# Altium footprint library Capacitor.PcbLib: 73 footprints (part 4 of 5)
Each footprint in its own frame and in the unit in brackets; x right, y up, seen from the top. Pads: shape width x height; smd on the part's side, far side on the other; paste and mask are expansions set on the pad; w line width, h text height; cw(c..) or ccw(c..) is an arc to the next point about the centre after c.
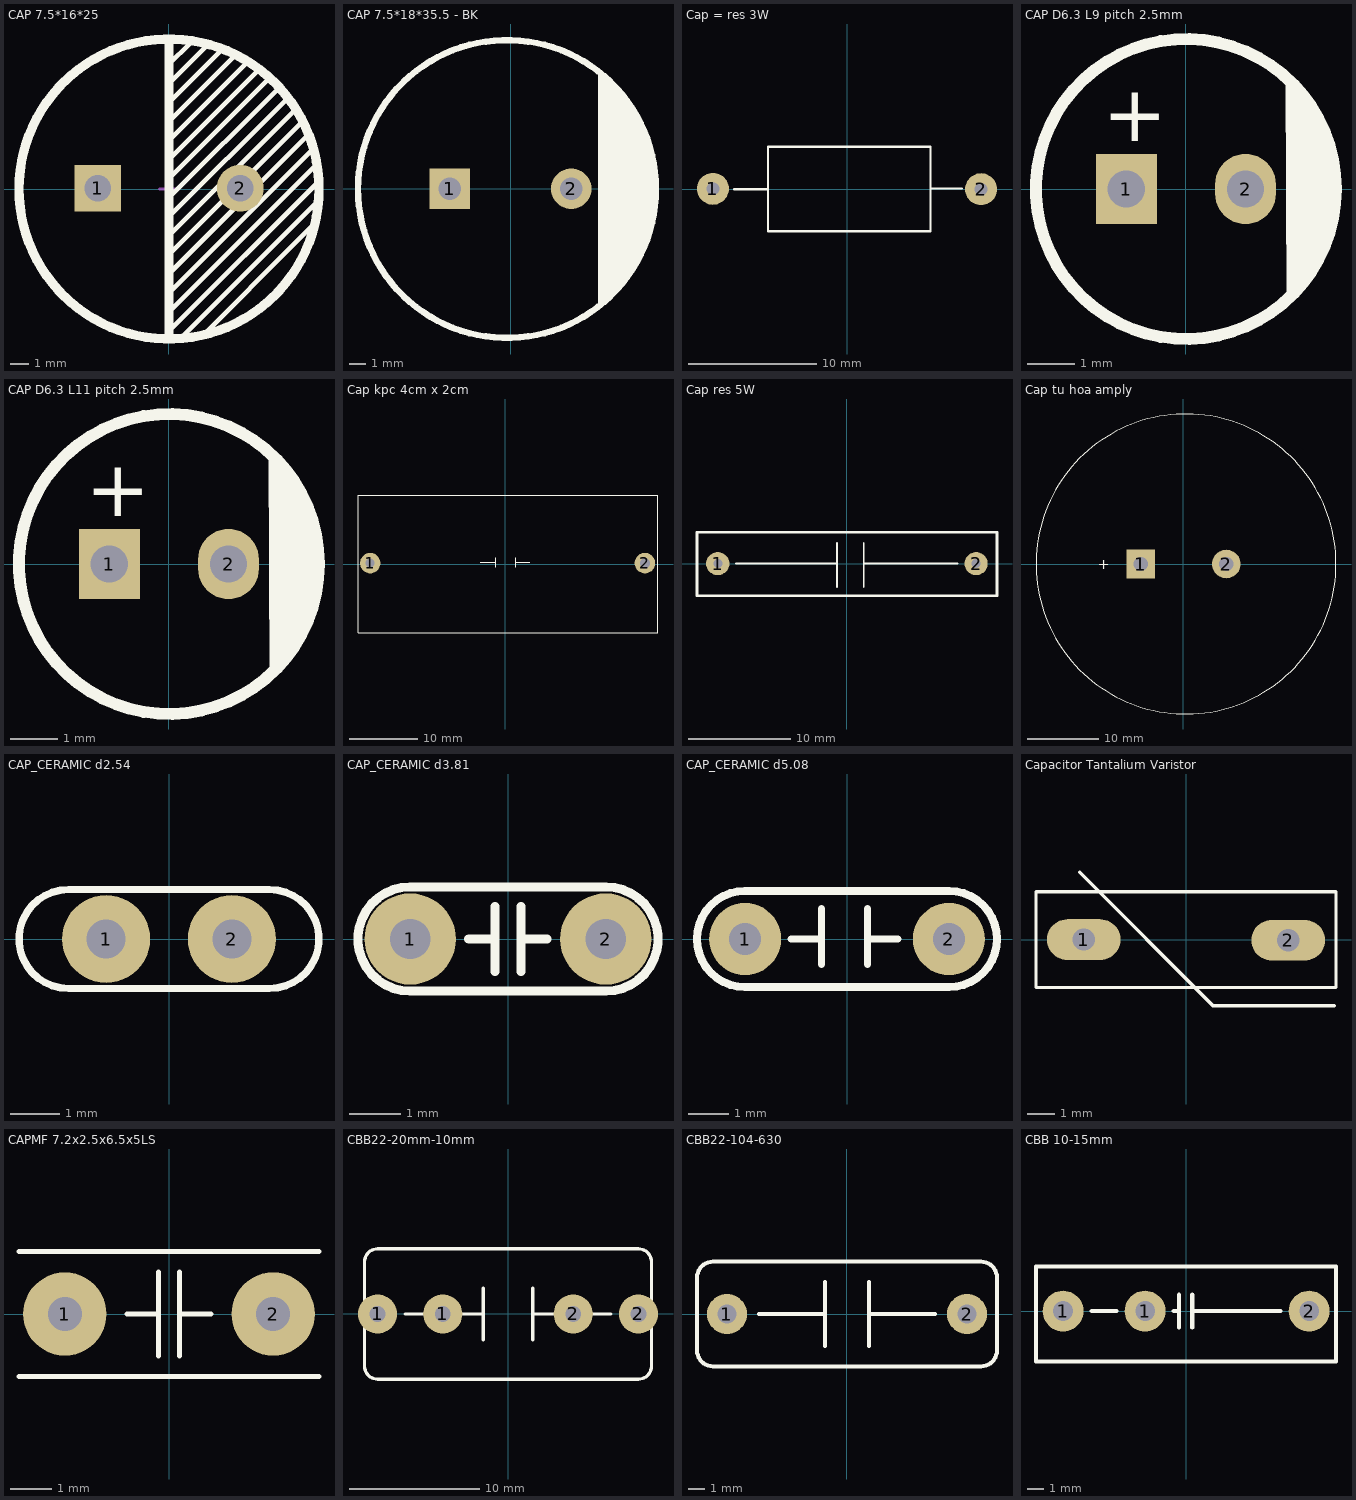
[diagram p3: the footprints below, top view; thin cyan lines are the x and y axes]

## CAP 7.5*16*25 [mm]
pads (2):
  rect 2.5x2.5 hole 1.4: 1(-3.8,0.038)
  round 2.5 hole 1.4: 2(3.8,0.038)
Top Overlay:
  circle w0.5: c0,0 r8
  lines w0.254: 0,-7.582 8.001,0.419 ; 0,-6.566 7.874,1.308 ; 0,-5.55 7.62,2.07 ; 0,-4.534 7.366,2.832 ; 0,-3.518 6.972,3.454 ; 0,-2.502 6.604,4.102 ; 0,-1.486 6.223,4.737 ; 0,-0.47 5.905,5.436 ; 0,0.546 5.296,5.842 ; 0,1.562 4.826,6.388 ; 0,2.578 4.064,6.642 ; 0,3.594 3.556,7.15 ; 0,4.61 2.54,7.15 2.769,7.379 ; 0,5.626 2.032,7.658 ; 0,6.642 1.143,7.785 ; 0.66,-7.938 7.938,-0.66 ; 2.032,-7.582 6.604,-3.01 7.81,-1.803
  lines w0.5: 0,-7.963 0,7.963
Top Designator:
  text ".Designator" at -3.71,-0.344 h1.52
Mechanical 12:
  lines w0.15: -0.5,0 0.5,0 ; 0,-0.5 0,0.5
3D body "CAP 7.5X16X25.STEP": height 25.03, standoff -3.38, extent -7.987,-7.999 8.01,7.999

## CAP 7.5*18*35.5 - BK [mm] "Pin to Pin 7.5mm. DxL 18x35.5mm"
pads (2):
  rect 2.5x2.5 hole 1.4: 1(-3.78,0)
  round 2.5 hole 1.4: 2(3.72,0)
Top Overlay:
  circle w0.4: c-0.248,-0.013 r9.2
  region: 5.375,-7.061 5.375,-7.098 5.413,-7.16 5.479,-7.192 5.552,-7.184 5.58,-7.162 5.852,-6.95 6.361,-6.487 6.833,-5.988 7.267,-5.453 7.659,-4.888 8.007,-4.294 8.309,-3.676 8.563,-3.037 8.768,-2.38 8.923,-1.71 9.027,-1.03 9.079,-0.344 9.079,0 9.079,0.344 9.027,1.03 8.923,1.71 8.768,2.38 8.563,3.037 8.309,3.676 8.007,4.294 7.659,4.888 7.267,5.453 6.833,5.988 6.361,6.487 5.852,6.95 5.58,7.162 5.552,7.184 5.479,7.192 5.413,7.16 5.375,7.098 5.375,7.061
Top Designator:
  text ".Designator" at -3.958,-0.357 h1.52
3D body "CAP 7.5X18X35.5.STEP": height 35.54, standoff -3.37, extent -8.985,-8.987 9.01,8.987

## Cap = res 3W [mm] "R2W, 2 pin, 700mil"
height 5.08
pads (2):
  round 2.5 hole 1: 1(-10.503,0.013) 2(10.503,-0.013)
Top Overlay:
  lines w0.178: -8.826,-0.013 -6.185,-0.013 ; 6.566,0.038 9.004,0.038 ; -6.185,-3.315 -6.185,0.038 -6.185,3.315 6.54,3.315 6.54,-3.315 -6.185,-3.315
Top Designator:
  text ".Designator" at -3.71,-0.344 h1.52
3D body: height 20, standoff 0.1, extent -12.065,-3.175 12.065,3.101

## CAP D6.3 L9 pitch 2.5mm [mm]
pads (2):
  rect 1.3x1.5 hole 0.8: 1(-1.27,0)
  oval 1.3x1.5 hole 0.8: 2(1.27,0)
Top Overlay:
  circle w0.254: c0,0 r3.2
  region: 2.147,-2.372 2.314,-2.222 2.601,-1.878 2.837,-1.497 3.018,-1.087 3.14,-0.655 3.201,-0.211 3.199,0.238 3.135,0.681 3.009,1.112 2.825,1.52 2.585,1.899 2.295,2.241 2.127,2.39
  text "+" at -1.778,1.016 h1.2
Top Designator:
  text ".Designator" at -3.71,-0.344 h1.52
3D body "Aluminum_electrolytic_capacitor_radial_D6.3_H9_PinD0.5_Pitch2.5_nominal_black.step": height 9.05, standoff -2.95, extent -3.138,-3.142 3.138,3.142

## CAP D6.3 L11 pitch 2.5mm [mm]
pads (2):
  rect 1.3x1.5 hole 0.8: 1(-1.27,0)
  oval 1.3x1.5 hole 0.8: 2(1.27,0)
Top Overlay:
  circle w0.254: c0,0 r3.2
  region: 2.147,-2.372 2.314,-2.222 2.601,-1.878 2.837,-1.497 3.018,-1.087 3.14,-0.655 3.201,-0.211 3.199,0.238 3.135,0.681 3.009,1.112 2.825,1.52 2.585,1.899 2.295,2.241 2.127,2.39
  text "+" at -1.778,1.016 h1.2
Top Designator:
  text ".Designator" at -3.71,-0.344 h1.52
3D body "Aluminum_electrolytic_capacitor_radial_D6.3_H11_PinD0.5_Pitch2.5_nominal_black.step": height 11.05, standoff -2.95, extent -3.138,-3.142 3.138,3.142

## Cap kpc 4cm x 2cm [mm] "Cap"
height 5.08
pads (2):
  round 3 hole 1.3: 1(-19.685,0.127)
  round 3 hole 1.5: 2(20.32,0.127)
Top Overlay:
  lines w0.178: -3.632,0.254 -1.499,0.254 ; -1.397,-0.508 -1.397,0.889 ; 1.499,-0.457 1.499,0.94 ; 1.499,0.254 3.556,0.254
  lines w0.18: -21.463,-10 -21.463,10 22.225,10 22.225,-10 -21.463,-10
Top Designator:
  text ".Designator" at -3.329,-0.344 h1.52
3D body "User Library-ICEL CAP.step": height 17.98, standoff -6, extent -20.115,-8.763 20.877,9.237

## Cap res 5W [mil] "Tu loc 220"
height 100
pads (2):
  round 90 hole 35: 1(-500,0) 2(500,0)
Top Overlay:
  lines w7: -430,0 -39,0 ; -39,-90 -39,81 ; 65,-90 65,81 ; 65,0 429,0
  lines w10: -580.42,-125 -580.42,122.09 581,122.09 581,-125 -580.42,-125
Top Designator:
  text ".Designator" at -145.78,-15 h60
3D body: height 0, standoff 0, extent -500,0 -500,0
3D body: height 0, standoff 0, extent 500,0 500,0
3D body: height 787.4, standoff 3.94, extent -580.42,-125 580,122.09

## Cap tu hoa amply [mm] "cap 12mm D42mm"
height 41
pads (2):
  rect 4x4 hole 2: 1(-6,0)
  round 4 hole 2: 2(6,0)
Top Overlay:
  circle w0.127: c0.35,0 r21
  text "+" at -11.975,-0.737 h1.5
Top Designator:
  text ".Designator" at -3.36,-0.344 h1.52
3D body "User Library-Cap 25x50.STEP": height 50, standoff -19, extent -12.252,-12.446 12.723,12.554

## CAP_CERAMIC d2.54 [mil] "Tu gom mini"
pads (2):
  round 70 hole 31: 1(-50,0) 2(50,0)
Top Overlay:
  lines w5.91: -80,-39.37 cw(c-80,0) -80,39.37 80,39.37 cw(c80,0) 80,-39.37 -80,-39.37
Top Designator:
  text ".Designator" at -146.08,-13.54 h60
3D body "User Library-Cap 100n.step": height 240.98, standoff -70.87, extent -114.78,-33.39 115,33.4

## CAP_CERAMIC d3.81 [mil]
height 200
pads (2):
  round 70 hole 31: 1(-75,0) 2(75,0)
Top Overlay:
  lines w7: -30.08,0 -10.08,0 ; -10.08,-25 -10.08,25 ; 9.92,-25 9.92,25 ; 9.92,0 29.92,0 ; -75,-40 cw(c-75,0) -75,40 75,40 cw(c75,0) 75,-40 -75,-40
Top Designator:
  text ".Designator" at -146.08,-13.54 h60
3D body "User Library-Ceramic Capacitor 5x3_75mm.STEP": height 254.27, standoff -98.43, extent -96.8,-38.74 96.79,40

## CAP_CERAMIC d5.08 [mm]
height 5.08
pads (2):
  round 1.8 hole 0.8: 1(-2.54,0) 2(2.54,0)
Top Overlay:
  lines w0.178: -1.397,0 -0.635,0 ; -0.635,-0.635 -0.635,0.762 ; 0.508,-0.635 0.508,0.762 ; 0.508,0 1.27,0
  lines w0.2: -2.54,-1.2 cw(c-2.54,0) -2.54,1.2 ; -2.5,-1.2 2.5,-1.2 ; -2.5,1.2 2.5,1.2 ; 2.54,-1.2 ccw(c2.54,0) 2.54,1.2
Top Designator:
  text ".Designator" at -3.634,-0.3 h1.52
3D body "tu hoa 5mm.step": height 10.35, standoff -2.22, extent -3.924,-1.123 4.076,1.387

## Capacitor Tantalium Varistor [mm] "Tu chong set"
pads (2):
  oval 2.7x1.5 hole 0.813: 1(-3.75,0.013) 2(3.75,-0.012)
Top Overlay:
  lines w0.127: -3.901,2.478 0.989,-2.412 5.434,-2.412 ; -5.498,-1.745 -5.498,1.77 5.498,1.77 5.498,-1.745 -5.498,-1.745
Top Designator:
  text ".Designator" at -3.71,-0.311 h1.52
3D body "Tantalio.STEP": height 9.14, standoff -1.05, extent -4,-1.165 4,1.225

## CAPMF 7.2x2.5x6.5x5LS [mm] "Capacitor, THT, Metallized Polyester Film"
height 8.2
pads (2):
  round 2 hole 0.813: 1(-2.5,0) 2(2.5,0)
Top Overlay:
  lines w0.127: -3.6,-1.5 3.6,-1.5 ; -3.6,1.5 3.6,1.5 ; -1,0 -0.25,0 ; -0.25,-1 -0.25,1 ; 0.25,-1 0.25,1 ; 0.25,0 1,0
Top Designator:
  text ".Designator" at -3.71,-0.344 h1.52
3D body "Cap, film, 7.2x2.5x6.5x5LS.STEP": height 7.5, standoff -2, extent -3.6,-1.25 3.6,1.25

## CBB22-20mm-10mm [mm]
pads (4):
  round 3 hole 1.2: 1(-10,0) 1(-5,0) 2(5,0) 2(10,0)
Top Overlay:
  lines w0.254: -7.888,0 -1.888,0 ; -1.888,-2 -1.888,2 ; 1.888,-2 1.888,2 ; 1.888,0 7.888,0 ; -11,-4 ccw(c-10,-4) -10,-5 10,-5 ccw(c10,-4) 11,-4 11,4 ccw(c10,4) 10,5 -10,5 ccw(c-10,4) -11,4 -11,-4
Top Designator:
  text ".Designator" at -3.71,-0.344 h1.52
3D body "684_400V_20MM.STEP": height 13, standoff -3.5, extent -10.889,-4 11.111,4

## CBB22-104-630 [mm]
pads (2):
  round 2.5 hole 1.2: 1(-7.5,0) 2(7.5,0)
Top Overlay:
  lines w0.254: -8.373,3.273 ccw(c-8.373,2.273) -9.373,2.273 -9.373,-2.273 ccw(c-8.373,-2.273) -8.373,-3.273 8.373,-3.273 ccw(c8.373,-2.273) 9.373,-2.273 9.373,2.273 ccw(c8.373,2.273) 8.373,3.273 -8.25,3.273 ; -5.5,0 -1.388,0 ; -1.388,-2 -1.388,2 ; 1.388,-2 1.388,2 ; 1.388,0 5.5,0
Top Designator:
  text ".Designator" at -3.71,-0.344 h1.52

## CBB 10-15mm [mm] "15*18*11mm"
pads (3):
  round 2.5 hole 1.2: 1(-7.5,0) 1(-2.5,0) 2(7.5,0)
Top Overlay:
  lines w0.254: -5.75,0 -4.25,0 ; -0.75,0 -0.515,0 ; -0.426,-1 -0.426,1 ; 0.374,-1 0.374,1 ; 0.501,0 5.75,0 ; -9.151,-3.073 9.137,-3.073 9.137,2.718 -9.151,2.718 -9.151,-3.073
Top Designator:
  text ".Designator" at -3.717,-0.522 h1.52
3D body "CBB 15X18X11.STEP": height 11.53, standoff -3.47, extent -9.007,-2.921 8.993,2.579